# Altium footprint library DC5-36-TO-DC3V3-5.PcbLib: 1 footprints
Each footprint in its own frame and in the unit in brackets; x right, y up, seen from the top. Pads: shape width x height; smd on the part's side, far side on the other; paste and mask are expansions set on the pad; w line width, h text height; cw(c..) or ccw(c..) is an arc to the next point about the centre after c.
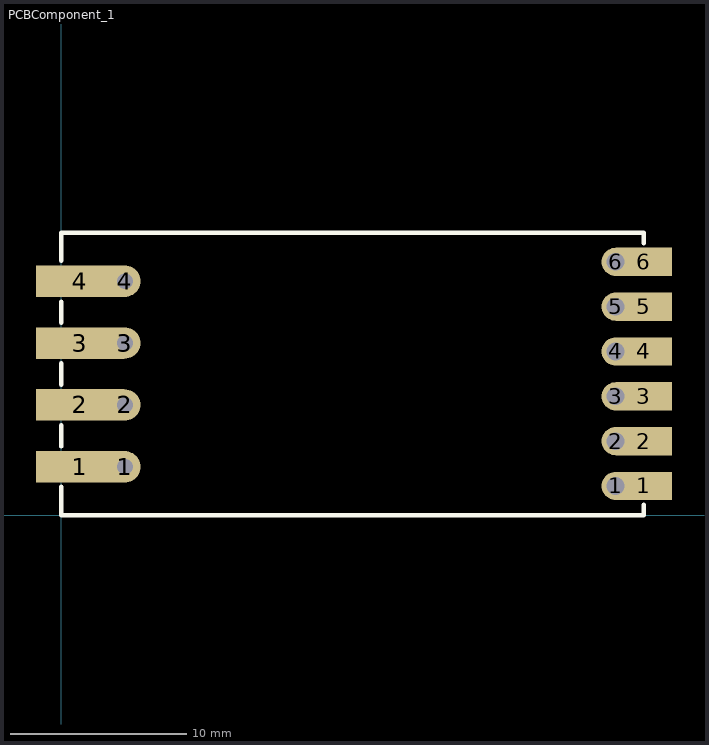
[diagram p0: the footprint, top view; thin cyan lines are the x and y axes]

## PCBComponent_1 [mm]
pads (20):
  rect 5x1.778 all layers, no hole: 1(1.05,2.742) 2(1.05,6.247) 3(1.05,9.752) 4(1.05,13.258)
  round 1.778 hole 0.889: 1(3.6,2.742) 2(3.6,6.247) 3(3.6,9.752) 4(3.6,13.258)
  round 1.6 hole 1: 1(31.395,1.655) 2(31.395,4.195) 3(31.395,6.735) 4(31.395,9.275) 5(31.395,11.815) 6(31.395,14.355)
  rect 3.2x1.6 all layers, no hole: 1(33.005,1.655) 2(33.005,4.195) 3(33.005,6.735) 4(33.005,9.275) 5(33.005,11.815) 6(33.005,14.355)
Top Overlay:
  lines w0.254: 0,1.603 0,0 1.2,0 31.8,0 33.005,0 33.005,0.603 ; 0,3.893 0,5.093 ; 0,7.398 0,8.598 ; 0,10.903 0,12.103 ; 0,14.403 0,16 1.2,16 31.8,16 33.005,16 33.005,15.403